# Altium footprint library Footprint-Lib-PhilsLab.PcbLib: 352 footprints (part 18 of 22)
Each footprint in its own frame and in the unit in brackets; x right, y up, seen from the top. Pads: shape width x height; smd on the part's side, far side on the other; paste and mask are expansions set on the pad; w line width, h text height; cw(c..) or ccw(c..) is an arc to the next point about the centre after c.
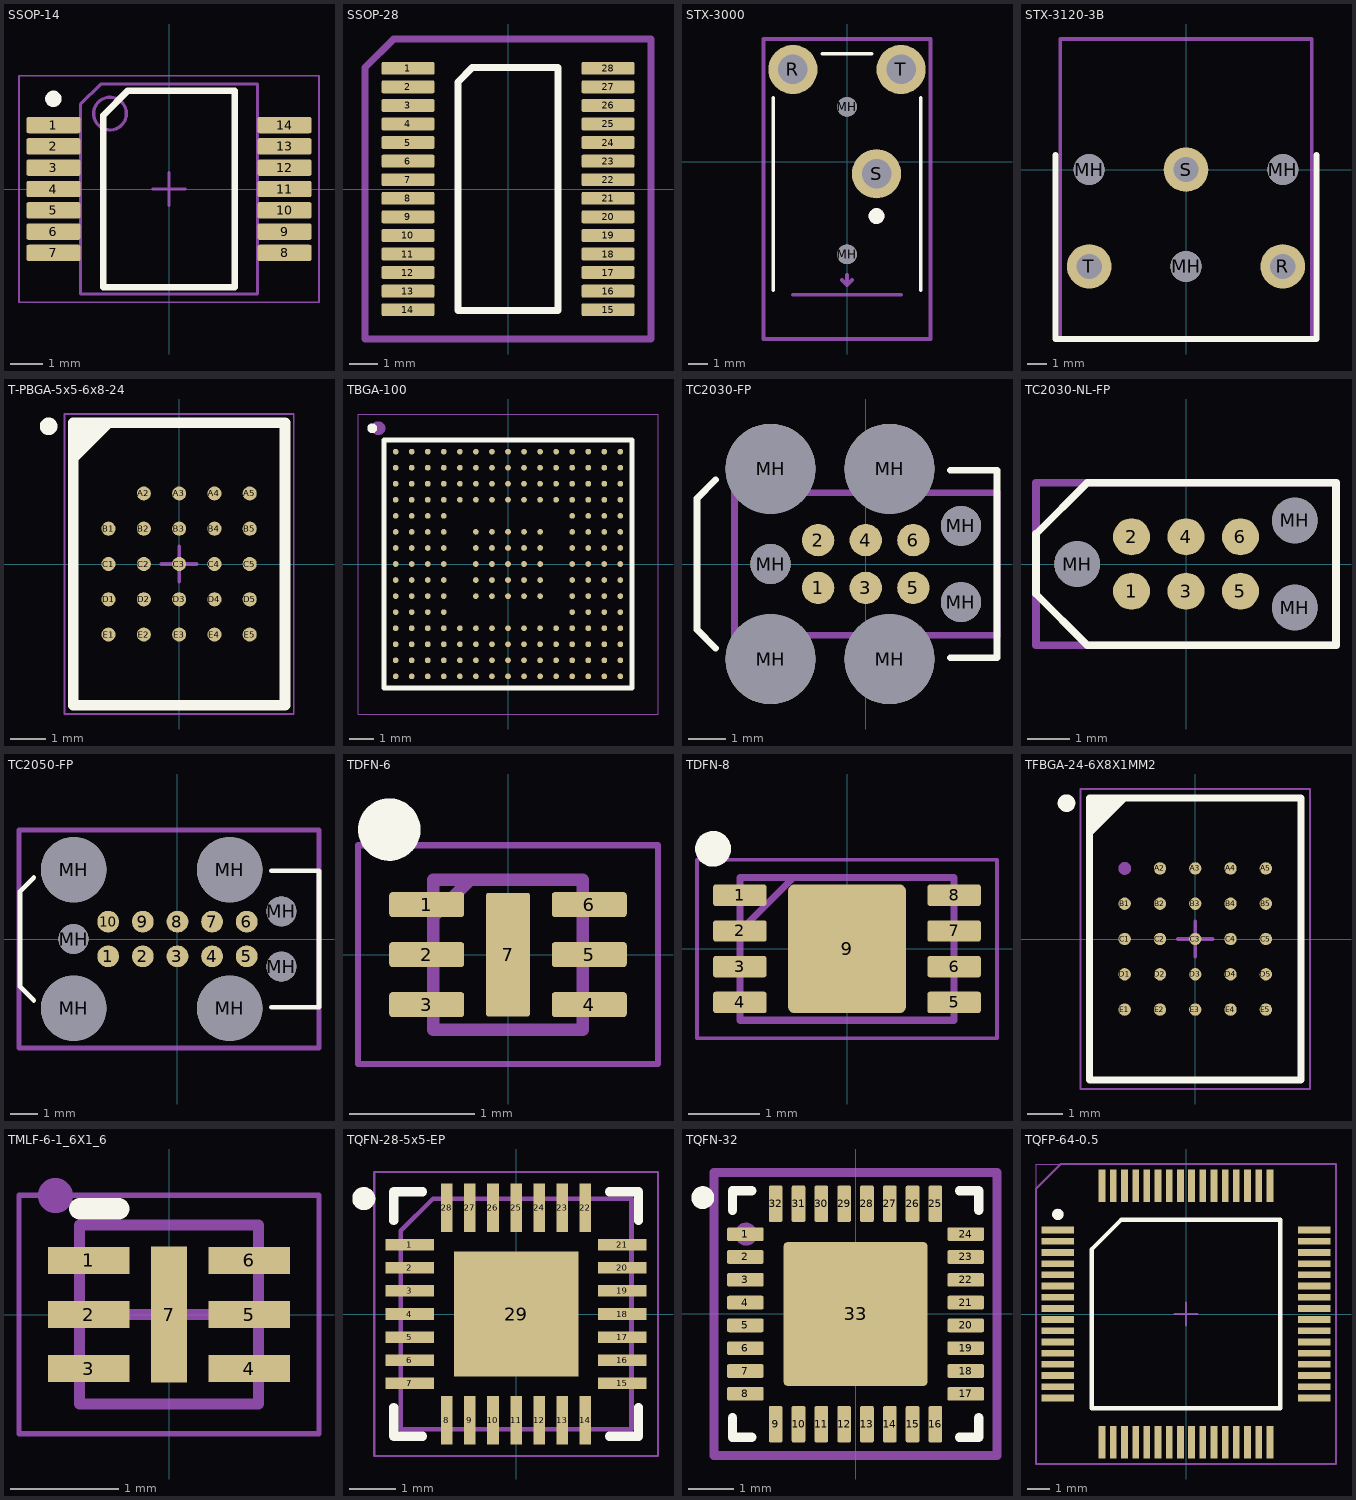
[diagram p17: the footprints below, top view; thin cyan lines are the x and y axes]

## SSOP-14 [mm]
height 2
pads (14):
  rrect25% 1.65x0.5 smd mask+0.15: 1(-3.525,1.95) 2(-3.525,1.3) 3(-3.525,0.65) 4(-3.525,0) 5(-3.525,-0.65) 6(-3.525,-1.3) 7(-3.525,-1.95) 8(3.525,-1.95) 9(3.525,-1.3) 10(3.525,-0.65) 11(3.525,0) 12(3.525,0.65) 13(3.525,1.3) 14(3.525,1.95)
Top Overlay:
  circle w0.25: c-3.525,2.75 r0.125
  lines w0.2: -2,-3 -2,2.25 -1.25,3 2,3 2,-3 -2,-3
Mechanical 13:
  circle w0.1: c-1.8,2.3 r0.5
  lines w0.1: -2.7,-3.2 -2.7,2.579 -2.079,3.2 2.7,3.2 2.7,-3.2 -2.7,-3.2
  text "'.Designator'" at -6.315,-1.4 h1
Mechanical 15:
  lines w0.05: -4.575,-3.45 4.575,-3.45 4.575,3.45 -4.575,3.45 -4.575,-3.45
  lines w0.1: -0.5,0 0.5,0 ; 0,-0.5 0,0.5
3D body "SSOP-14.step": height 2, standoff 0, extent -3.875,-3.2 3.875,3.2

## SSOP-28 [mm]
pads (28):
  rrect25% 1.85x0.45 smd mask+0.15: 1(-3.5,4.225) 2(-3.5,3.575) 3(-3.5,2.925) 4(-3.5,2.275) 5(-3.5,1.625) 6(-3.5,0.975) 7(-3.5,0.325) 8(-3.5,-0.325) 9(-3.5,-0.975) 10(-3.5,-1.625) 11(-3.5,-2.275) 12(-3.5,-2.925) 13(-3.5,-3.575) 14(-3.5,-4.225) 15(3.5,-4.225) 16(3.5,-3.575) 17(3.5,-2.925) 18(3.5,-2.275) 19(3.5,-1.625) 20(3.5,-0.975) 21(3.5,-0.325) 22(3.5,0.325) 23(3.5,0.975) 24(3.5,1.625) 25(3.5,2.275) 26(3.5,2.925) 27(3.5,3.575) 28(3.5,4.225)
Top Overlay:
  lines w0.25: -1.75,-4.25 1.75,-4.25 1.75,4.25 -1.25,4.25 -1.75,3.75 -1.75,-4.25
Mechanical 13:
  lines w0.25: -5,-5.25 5,-5.25 5,5.25 -4,5.25 -5,4.25 -5,-5.25
  text "'.Designator'" at -5.815,-0.9 h1
3D body "SSOP-28.STEP": height 2.01, standoff 0.01, extent -3.909,-5.108 3.891,5.092

## STX-3000 [mm]
height 5.4
pads (5):
  round 1 hole 1 unplated: MH(0,-4.7) MH(0,2.8)
  round 2.5 hole 1.5: R(-2.75,4.7) S(1.5,-0.6) T(2.75,4.7)
Top Overlay:
  circle w0.5: c1.5,-2.75 r0.15
  lines w0.2: -3.75,-6.5 -3.75,3.25 ; -1.25,5.5 1.25,5.5 ; 3.75,-6.5 3.75,3.25
Mechanical 13:
  circle w0.5: c1.5,-2.75 r0.15
  lines w0.2: -2.75,-6.75 2.75,-6.75 ; -0.25,-6 0,-6.25 ; 0,-5.75 0,-6.25 ; 0.25,-6 0,-6.25 ; -4.25,-9 -4.25,-5 -4.25,6.25 4.25,6.25 4.25,-7.25 4.25,-9 -4.25,-9
  text "'.Designator'" at -5.665,-0.417 h1
3D body "STX-3000.stp": height 5.93, standoff -2.72, extent -3.6,-8.7 3.6,5.266

## STX-3120-3B [mm]
pads (6):
  round 1.6 hole 1.6 unplated: MH(-5,0) MH(0,-5) MH(5,0)
  round 2.3 hole 1.3: R(5,-5) S(0,0) T(-5,-5)
Top Overlay:
  lines w0.3: -6.75,0.75 -6.75,-8.75 6.75,-8.75 6.75,0.75
Mechanical 13:
  lines w0.2: -6.5,-8.75 6.5,-8.75 6.5,6.75 -6.5,6.75 -6.5,-8.75
  text ".Designator" at -4.998,-0.333 h1
3D body "STX-3120-3B.STEP": height 10.22, standoff -3.68, extent -6,-8.6 6,6.5

## T-PBGA-5x5-6x8-24 [mm]
height 1.2
pads (24):
  round 0.4 smd mask+0.05: A2(-1,2) A3(0,2) A4(1,2) A5(2,2) B1(-2,1) B2(-1,1) B3(0,1) B4(1,1) B5(2,1) C1(-2,0) C2(-1,0) C3(0,0) C4(1,0) C5(2,0) D1(-2,-1) D2(-1,-1) D3(0,-1) D4(1,-1) D5(2,-1) E1(-2,-2) E2(-1,-2) E3(0,-2) E4(1,-2) E5(2,-2)
Top Overlay:
  circle w0.25: c-3.7,3.9 r0.125
  region: -2,4 -3,3 -3,4
  lines w0.3: -3,3 -2,4 ; -3,-4 -3,4 3,4 3,-4 -3,-4
Mechanical 13:
  lines w0.1: -3,-4 -3,4 3,4 3,-4 -3,-4
Mechanical 15:
  lines w0.05: -3.25,-4.25 -3.25,4.25 3.25,4.25 3.25,-4.25 -3.25,-4.25
  lines w0.1: -0.5,0 0.5,0 ; 0,-0.5 0,0.5
3D body "T-PBGA-5x5-6x8-24.step": height 1.2, standoff 0, extent -3,-4 3,4

## TBGA-100 [mm]
pads (201):
  round 0.232 smd: A1(-4.55,4.55) A2(-3.9,4.55) A3(-3.25,4.55) A4(-2.6,4.55) A5(-1.95,4.55) A6(-1.3,4.55) A7(-0.65,4.55) A8(0,4.55) A9(0.65,4.55) A10(1.3,4.55) A11(1.95,4.55) A12(2.6,4.55) A13(3.25,4.55) A14(3.9,4.55) A15(4.55,4.55) B1(-4.55,3.9) B2(-3.9,3.9) B3(-3.25,3.9) B4(-2.6,3.9) B5(-1.95,3.9) B6(-1.3,3.9) B7(-0.65,3.9) B8(0,3.9) B9(0.65,3.9) B10(1.3,3.9) B11(1.95,3.9) B12(2.6,3.9) B13(3.25,3.9) B14(3.9,3.9) B15(4.55,3.9) C1(-4.55,3.25) C2(-3.9,3.25) C3(-3.25,3.25) C4(-2.6,3.25) C5(-1.95,3.25) C6(-1.3,3.25) C7(-0.65,3.25) C8(0,3.25) C9(0.65,3.25) C10(1.3,3.25) C11(1.95,3.25) C12(2.6,3.25) C13(3.25,3.25) C14(3.9,3.25) C15(4.55,3.25) D1(-4.55,2.6) D2(-3.9,2.6) D3(-3.25,2.6) D4(-2.6,2.6) D5(-1.95,2.6) D6(-1.3,2.6) D7(-0.65,2.6) D8(0,2.6) D9(0.65,2.6) D10(1.3,2.6) D11(1.95,2.6) D12(2.6,2.6) D13(3.25,2.6) D14(3.9,2.6) D15(4.55,2.6) E1(-4.55,1.95) E2(-3.9,1.95) E3(-3.25,1.95) E4(-2.6,1.95) E12(2.6,1.95) E13(3.25,1.95) E14(3.9,1.95) E15(4.55,1.95) F1(-4.55,1.3) F2(-3.9,1.3) F3(-3.25,1.3) F4(-2.6,1.3) F6(-1.3,1.3) F7(-0.65,1.3) F8(0,1.3) F9(0.65,1.3) F10(1.3,1.3) F12(2.6,1.3) F13(3.25,1.3) F14(3.9,1.3) F15(4.55,1.3) G1(-4.55,0.65) G2(-3.9,0.65) G3(-3.25,0.65) G4(-2.6,0.65) G6(-1.3,0.65) G7(-0.65,0.65) G8(0,0.65) G9(0.65,0.65) G10(1.3,0.65) G12(2.6,0.65) G13(3.25,0.65) G14(3.9,0.65) G15(4.55,0.65) H1(-4.55,0) H2(-3.9,0) H3(-3.25,0) H4(-2.6,0) H6(-1.3,0) H7(-0.65,0) H8(0,0) H9(0.65,0) H10(1.3,0) H12(2.6,0) H13(3.25,0) H14(3.9,0) H15(4.55,0) J1(-4.55,-0.65) J2(-3.9,-0.65) J3(-3.25,-0.65) J4(-2.6,-0.65) J6(-1.3,-0.65) J7(-0.65,-0.65) J8(0,-0.65) J9(0.65,-0.65) J10(1.3,-0.65) J12(2.6,-0.65) J13(3.25,-0.65) J14(3.9,-0.65) J15(4.55,-0.65) K1(-4.55,-1.3) K2(-3.9,-1.3) K3(-3.25,-1.3) K4(-2.6,-1.3) K6(-1.3,-1.3) K7(-0.65,-1.3) K8(0,-1.3) K9(0.65,-1.3) K10(1.3,-1.3) K12(2.6,-1.3) K13(3.25,-1.3) K14(3.9,-1.3) K15(4.55,-1.3) L1(-4.55,-1.95) L2(-3.9,-1.95) L3(-3.25,-1.95) L4(-2.6,-1.95) L12(2.6,-1.95) L13(3.25,-1.95) L14(3.9,-1.95) L15(4.55,-1.95) M1(-4.55,-2.6) M2(-3.9,-2.6) M3(-3.25,-2.6) M4(-2.6,-2.6) M5(-1.95,-2.6) M6(-1.3,-2.6) M7(-0.65,-2.6) M8(0,-2.6) M9(0.65,-2.6) M10(1.3,-2.6) M11(1.95,-2.6) M12(2.6,-2.6) M13(3.25,-2.6) M14(3.9,-2.6) M15(4.55,-2.6) N1(-4.55,-3.25) N2(-3.9,-3.25) N3(-3.25,-3.25) N4(-2.6,-3.25) N5(-1.95,-3.25) N6(-1.3,-3.25) N7(-0.65,-3.25) N8(0,-3.25) N9(0.65,-3.25) N10(1.3,-3.25) N11(1.95,-3.25) N12(2.6,-3.25) N13(3.25,-3.25) N14(3.9,-3.25) N15(4.55,-3.25) P1(-4.55,-3.9) P2(-3.9,-3.9) P3(-3.25,-3.9) P4(-2.6,-3.9) P5(-1.95,-3.9) P6(-1.3,-3.9) P7(-0.65,-3.9) P8(0,-3.9) P9(0.65,-3.9) P10(1.3,-3.9) P11(1.95,-3.9) P12(2.6,-3.9) P13(3.25,-3.9) P14(3.9,-3.9) P15(4.55,-3.9) R1(-4.55,-4.55) R2(-3.9,-4.55) R3(-3.25,-4.55) R4(-2.6,-4.55) R5(-1.95,-4.55) R6(-1.3,-4.55) R7(-0.65,-4.55) R8(0,-4.55) R9(0.65,-4.55) R10(1.3,-4.55) R11(1.95,-4.55) R12(2.6,-4.55) R13(3.25,-4.55) R14(3.9,-4.55) R15(4.55,-4.55)
Top Overlay:
  circle w0.2: c-5.5,5.5 r0.1
  lines w0.2: -5.016,-5.016 5.016,-5.016 5.016,5.016 -5.016,5.016 -5.016,-5.016
Mechanical 13:
  circle w0.5: c-5.25,5.5 r0.031
  lines w0.1: -5,-5 5,-5 5,5 -5,5 -5,-5
  text "'.Designator'" at -5.815,-0.9 h1
Mechanical 15:
  lines w0.05: -6.075,-6.075 6.075,-6.075 6.075,6.075 -6.075,6.075 -6.075,-6.075
3D body "STM32H730IBK6Q.stp": height 0.6, standoff 0, extent -5,-5 5,5

## TC2030-FP [mm]
pads (13):
  round 0.863 smd paste-0.432: 1(-1.27,-0.635) 2(-1.27,0.635) 3(0,-0.635) 4(0,0.635) 5(1.27,-0.635) 6(1.27,0.635)
  round 2.4 hole 2.4 unplated: MH(-2.54,-2.54) MH(-2.54,2.54) MH(0.635,-2.54) MH(0.635,2.54)
  round 1.067 hole 1.067 unplated: MH(-2.54,0) MH(2.54,-1.016) MH(2.54,1.016)
Top Overlay:
  lines w0.175: -4,-2.25 -4.5,-1.75 -4.5,1.75 -4,2.25 ; 2.25,-2.5 3.5,-2.5 3.5,2.5 2.25,2.5
Mechanical 13:
  lines w0.175: -3.5,-1.9 3.5,-1.9 3.5,1.9 -3.5,1.9 -3.5,-1.9
  text "'.Designator'" at -8.633,-0.635 h1.52

## TC2030-NL-FP [mil]
pads (9):
  round 33.98 smd paste-16.99: 1(-50,-25) 2(-50,25) 3(0,-25) 4(0,25) 5(50,-25) 6(50,25)
  round 42.01 hole 42.01 unplated: MH(-100,0) MH(100,-40) MH(100,40)
Top Overlay:
  lines w6.89: -137.8,-27.56 -90.55,-74.8 137.8,-74.8 137.8,74.8 -90.55,74.8 -137.8,27.56 -137.8,-27.56
Mechanical 13:
  lines w6.89: -137.8,-74.8 137.8,-74.8 137.8,74.8 -137.8,74.8 -137.8,-74.8
  text "'.Designator'" at -339.89,-24.99 h60

## TC2050-FP [mm]
pads (17):
  round 0.8 smd paste-0.4: 1(-2.54,-0.635) 2(-1.27,-0.635) 3(0,-0.635) 4(1.27,-0.635) 5(2.54,-0.635) 6(2.54,0.635) 7(1.27,0.635) 8(0,0.635) 9(-1.27,0.635) 10(-2.54,0.635)
  round 2.4 hole 2.4 unplated: MH(-3.81,-2.54) MH(-3.81,2.54) MH(1.91,-2.54) MH(1.91,2.54)
  round 1.1 hole 1.1 unplated: MH(-3.81,0) MH(3.81,-1.016) MH(3.81,1.016)
Top Overlay:
  lines w0.175: -5.27,-2.25 -5.77,-1.75 -5.77,1.75 -5.27,2.25 ; 3.44,-2.5 5.19,-2.5 5.19,2.5 3.44,2.5
Mechanical 13:
  lines w0.175: -5.81,-4 -5.81,4 5.19,4 5.19,-4 -5.81,-4
  text "'.Designator'" at -8.633,-0.635 h1.52

## TDFN-6 [mm]
pads (7):
  rrect25% 0.6x0.2 smd mask+0.05: 1(-0.65,0.4) 2(-0.65,0) 3(-0.65,-0.4) 4(0.65,-0.4) 5(0.65,0) 6(0.65,0.4)
  rrect10% 0.35x0.99 smd mask+0.05: 7(0,0)
Top Overlay:
  circle w0.25: c-0.95,1 r0.125
Mechanical 13:
  lines w0.1: -0.6,0.3 -0.3,0.6 ; -0.6,-0.6 0.6,-0.6 0.6,0.6 -0.6,0.6 -0.6,-0.6
  text "'.Designator'" at -5.84,-0.925 h1
Mechanical 15:
  lines w0.05: -1.2,-0.875 1.2,-0.875 1.2,0.875 -1.2,0.875 -1.2,-0.875
3D body "MIC5528-3.3YMT-TR.stp": height 0.6, standoff 0, extent -0.65,-0.6 0.65,0.6

## TDFN-8 [mm]
pads (9):
  rrect25% 0.75x0.3 smd mask+0.05: 1(-1.5,0.75) 2(-1.5,0.25) 3(-1.5,-0.25) 4(-1.5,-0.75) 5(1.5,-0.75) 6(1.5,-0.25) 7(1.5,0.25) 8(1.5,0.75)
  rrect10% 1.65x1.8 smd mask+0.05: 9(0,0)
Top Overlay:
  circle w0.25: c-1.875,1.4 r0.125
Mechanical 13:
  lines w0.1: -1.5,0.25 -0.75,1 ; -1.5,-1 -1.5,1 1.5,1 1.5,-1 -1.5,-1
  text "'.Designator'" at -5.84,-0.925 h1
Mechanical 15:
  lines w0.05: -2.1,-1.25 -2.1,1.25 2.1,1.25 2.1,-1.25 -2.1,-1.25
3D body "MCP2557FDT-H_MNY.stp": height 0.8, standoff 0, extent -1.55,-1 1.55,1

## TFBGA-24-6X8X1MM2 [mm]
height 1.2
pads (24):
  round 0.35 smd: A2(-1,2) A3(0,2) A4(1,2) A5(2,2) B1(-2,1) B2(-1,1) B3(0,1) B4(1,1) B5(2,1) C1(-2,0) C2(-1,0) C3(0,0) C4(1,0) C5(2,0) D1(-2,-1) D2(-1,-1) D3(0,-1) D4(1,-1) D5(2,-1) E1(-2,-2) E2(-1,-2) E3(0,-2) E4(1,-2) E5(2,-2)
Top Overlay:
  circle w0.25: c-3.65,3.85 r0.125
  region: -2,4 -3,3 -3,4
  lines w0.2: -3,3 -2,4 ; -3,-4 -3,4 3,4 3,-4 -3,-4
Mechanical 13:
  circle w0.254: c-2,2 r0.053
  lines w0.1: -3,-4 -3,4 3,4 3,-4 -3,-4
  text ".Designator" at -4.998,-0.333 h1
Mechanical 15:
  lines w0.05: -3.25,-4.25 -3.25,4.25 3.25,4.25 3.25,-4.25 -3.25,-4.25
  lines w0.1: -0.5,0 0.5,0 ; 0,-0.5 0,0.5
3D body "TFBGA-24-6X8X1MM2.step": height 1.2, standoff 0, extent -3,-4 3,4

## TMLF-6-1_6X1_6 [mm]
height 0.6
pads (7):
  rect 0.75x0.25 smd mask+0.15: 1(-0.74,0.5) 2(-0.74,0) 3(-0.74,-0.5) 4(0.74,-0.5) 5(0.74,0) 6(0.74,0.5)
  rect 0.33x1.26 smd mask+0.15: 7(0,0)
Top Overlay:
  lines w0.2: -0.825,0.975 -0.465,0.975
Mechanical 13:
  circle w0.3: c-1.05,1.098 r0.011
  lines w0.1: -0.825,-0.825 0.825,-0.825 0.825,0.825 -0.825,0.825 -0.825,-0.825
  text "'.Designator'" at -5.815,-0.9 h1
Mechanical 15:
  lines w0.05: -1.385,-1.1 1.385,-1.1 1.385,1.1 -1.385,1.1 -1.385,-1.1
  lines w0.1: -0.5,0 0.5,0 ; 0,-0.5 0,0.5
3D body "TMLF-6-1_6X1_6.step": height 0.6, standoff 0, extent -0.826,-0.825 0.826,0.825

## TQFN-28-5x5-EP [mm] "QFN, 28-Leads, Body 5.00x5.00mm, Pitch 0.50mm, Thermal Pad 2.70x2.70mm, IPC Medium Density"
height 0.8
pads (29):
  rect 1.05x0.25 smd mask+0.15: 1(-2.3,1.5) 2(-2.3,1) 3(-2.3,0.5) 4(-2.3,0) 5(-2.3,-0.5) 6(-2.3,-1) 7(-2.3,-1.5) 15(2.3,-1.5) 16(2.3,-1) 17(2.3,-0.5) 18(2.3,0) 19(2.3,0.5) 20(2.3,1) 21(2.3,1.5)
  rect 0.25x1.05 smd mask+0.15: 8(-1.5,-2.3) 9(-1,-2.3) 10(-0.5,-2.3) 11(0,-2.3) 12(0.5,-2.3) 13(1,-2.3) 14(1.5,-2.3) 22(1.5,2.3) 23(1,2.3) 24(0.5,2.3) 25(0,2.3) 26(-0.5,2.3) 27(-1,2.3) 28(-1.5,2.3)
  rect 2.7x2.7 smd paste+0 mask+0.05: 29(0,0)
Top Overlay:
  circle w0.25: c-3.3,2.5 r0.125
  lines w0.2: -2.65,-2.025 -2.65,-2.65 -2.025,-2.65 ; -2.65,2.025 -2.65,2.65 -2.025,2.65 ; 2.025,-2.65 2.65,-2.65 2.65,-2.025 ; 2.025,2.65 2.65,2.65 2.65,2.025
Mechanical 13:
  lines w0.1: -2.5,-2.5 2.5,-2.5 2.5,2.5 -1.8,2.5 -2.5,1.8 -2.5,-2.5
  text "'.Designator'" at -5.815,-0.9 h1
Mechanical 15:
  lines w0.05: -3.075,-3.075 -3.075,3.075 3.075,3.075 3.075,-3.075 -3.075,-3.075
  lines w0.1: -0.5,0 0.5,0 ; 0,-0.5 0,0.5
3D body "TQFN-28-5x5-EP.step": height 0.8, standoff 0, extent -2.55,-2.55 2.55,2.55

## TQFN-32 [mm]
height 0.8
pads (33):
  rrect25% 0.8x0.3 smd mask+0.04: 1(-2.415,1.75) 8(-2.415,-1.75) 17(2.415,-1.75) 24(2.415,1.75)
  rrect25% 0.8x0.3 smd mask+0.05: 2(-2.415,1.25) 3(-2.415,0.75) 4(-2.415,0.25) 5(-2.415,-0.25) 6(-2.415,-0.75) 7(-2.415,-1.25) 18(2.415,-1.25) 19(2.415,-0.75) 20(2.415,-0.25) 21(2.415,0.25) 22(2.415,0.75) 23(2.415,1.25)
  rrect25% 0.3x0.8 smd mask+0.04: 9(-1.75,-2.415) 16(1.75,-2.415) 25(1.75,2.415) 32(-1.75,2.415)
  rrect25% 0.3x0.8 smd mask+0.05: 10(-1.25,-2.415) 11(-0.75,-2.415) 12(-0.25,-2.415) 13(0.25,-2.415) 14(0.75,-2.415) 15(1.25,-2.415) 26(1.25,2.415) 27(0.75,2.415) 28(0.25,2.415) 29(-0.25,2.415) 30(-0.75,2.415) 31(-1.25,2.415)
  rrect5% 3.15x3.15 smd: 33(0,0)
Top Overlay:
  circle w0.25: c-3.35,2.55 r0.125
  lines w0.2: -2.7,-2.275 -2.7,-2.7 -2.275,-2.7 ; -2.7,2.275 -2.7,2.7 -2.275,2.7 ; 2.275,-2.7 2.7,-2.7 2.7,-2.275 ; 2.275,2.7 2.7,2.7 2.7,2.275
Mechanical 13:
  circle w0.3: c-2.4,1.75 r0.1
  lines w0.2: -3.1,-3.1 3.1,-3.1 3.1,3.1 -3.1,3.1 -3.1,-3.1
  text "'.Designator'" at -5.665,-0.417 h1
Mechanical 15:
  lines w0.05: -3.1,-3.1 3.1,-3.1 3.1,3.1 -3.1,3.1 -3.1,-3.1
  lines w0.1: -0.5,0 0.5,0 ; 0,-0.5 0,0.5
3D body "TQFN-32.step": height 0.8, standoff 0, extent -2.551,-2.551 2.551,2.551

## TQFP-64-0.5 [mm] "TSQFP, 64-Leads, Body 10,00x10,00mm, Pitch 0,50mm, IPC Medium Density"
height 1.6
pads (64):
  rect 1.45x0.3 smd: 1(-5.725,3.75) 2(-5.725,3.25) 3(-5.725,2.75) 4(-5.725,2.25) 5(-5.725,1.75) 6(-5.725,1.25) 7(-5.725,0.75) 8(-5.725,0.25) 9(-5.725,-0.25) 10(-5.725,-0.75) 11(-5.725,-1.25) 12(-5.725,-1.75) 13(-5.725,-2.25) 14(-5.725,-2.75) 15(-5.725,-3.25) 16(-5.725,-3.75) 33(5.725,-3.75) 34(5.725,-3.25) 35(5.725,-2.75) 36(5.725,-2.25) 37(5.725,-1.75) 38(5.725,-1.25) 39(5.725,-0.75) 40(5.725,-0.25) 41(5.725,0.25) 42(5.725,0.75) 43(5.725,1.25) 44(5.725,1.75) 45(5.725,2.25) 46(5.725,2.75) 47(5.725,3.25) 48(5.725,3.75)
  rect 0.3x1.45 smd: 17(-3.75,-5.725) 18(-3.25,-5.725) 19(-2.75,-5.725) 20(-2.25,-5.725) 21(-1.75,-5.725) 22(-1.25,-5.725) 23(-0.75,-5.725) 24(-0.25,-5.725) 25(0.25,-5.725) 26(0.75,-5.725) 27(1.25,-5.725) 28(1.75,-5.725) 29(2.25,-5.725) 30(2.75,-5.725) 31(3.25,-5.725) 32(3.75,-5.725) 49(3.75,5.725) 50(3.25,5.725) 51(2.75,5.725) 52(2.25,5.725) 53(1.75,5.725) 54(1.25,5.725) 55(0.75,5.725) 56(0.25,5.725) 57(-0.25,5.725) 58(-0.75,5.725) 59(-1.25,5.725) 60(-1.75,5.725) 61(-2.25,5.725) 62(-2.75,5.725) 63(-3.25,5.725) 64(-3.75,5.725)
Top Overlay:
  circle w0.25: c-5.725,4.45 r0.125
  lines w0.2: -4.2,-4.2 -4.2,2.9 -2.9,4.2 4.2,4.2 4.2,-4.2 -4.2,-4.2
Mechanical 13:
  circle w0.1: c-5.724,4.454 r0.2
  lines w0.1: -6.7,-6.7 -6.7,5.6 -5.6,6.7 6.7,6.7 6.7,-6.7 -6.7,-6.7
  text "'.Designator'" at -5.815,-0.9 h1
Mechanical 15:
  lines w0.05: -6.7,-6.7 -6.7,6.7 6.7,6.7 6.7,-6.7 -6.7,-6.7
  lines w0.1: -0.5,0 0.5,0 ; 0,-0.5 0,0.5
3D body "TQFP-64-0.5.step": height 1.6, standoff 0, extent -6,-6 6,6